# EAGLE library part TLV76750DGNR (library TLV76750DGNR)
LDO Voltage Regulators Adjustable- and fixed-output, 1-A, 16-V, positive-voltage low-dropout (LDO) linear regulator 8-HVSSOP -40 to 125 Source: Datasheet <https://www.ti.com/lit/gpn/tlv767>
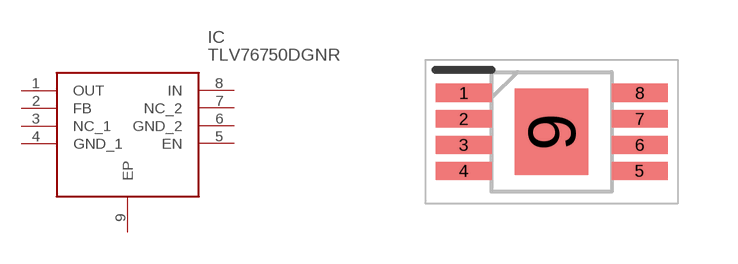
[diagram p0: symbol with the pads of SOP65P490X110-9N; footprint SOP65P490X110-9N]

Designator prefix IC

## TLV76750DGNR (Description: LDO Voltage Regulators Adjustable- and fixed-output, 1-A, 16-V, positive-voltage low-dropout (LDO) linear regulator 8-HVSSOP -40 to 125; Height: 1.1mm; Manufacturer_Name: Texas Instruments; Manufacturer_Part_Number: TLV76750DGNR; Mouser_Part_Number: 595-TLV76750DGNR; Mouser_Price-Stock: https://www.mouser.co.uk/ProductDetail/Texas-Instruments/TLV76750DGNR?qs=QNEnbhJQKvaJEVkWGWZhnw%3D%3D)  [SOP65P490X110-9N]
1  OUT
2  FB
3  NC_1
4  GND_1
5  EN
6  GND_2
7  NC_2
8  IN
9  EP

## Footprint SOP65P490X110-9N (pad centres in mm)
DGN (S-PDSO-G8)-
smd 1.4 x 0.45: 1 -2.2,0.975; 2 -2.2,0.325; 3 -2.2,-0.325; 4 -2.2,-0.975; 5 2.2,-0.975; 6 2.2,-0.325; 7 2.2,0.325; 8 2.2,0.975
smd 1.846 x 2.15: 9 0,0